# Altium footprint library SYNCBOX_V3I1.PcbLib: 251 footprints (part 9 of 16)
Each footprint in its own frame and in the unit in brackets; x right, y up, seen from the top. Pads: shape width x height; smd on the part's side, far side on the other; paste and mask are expansions set on the pad; w line width, h text height; cw(c..) or ccw(c..) is an arc to the next point about the centre after c.
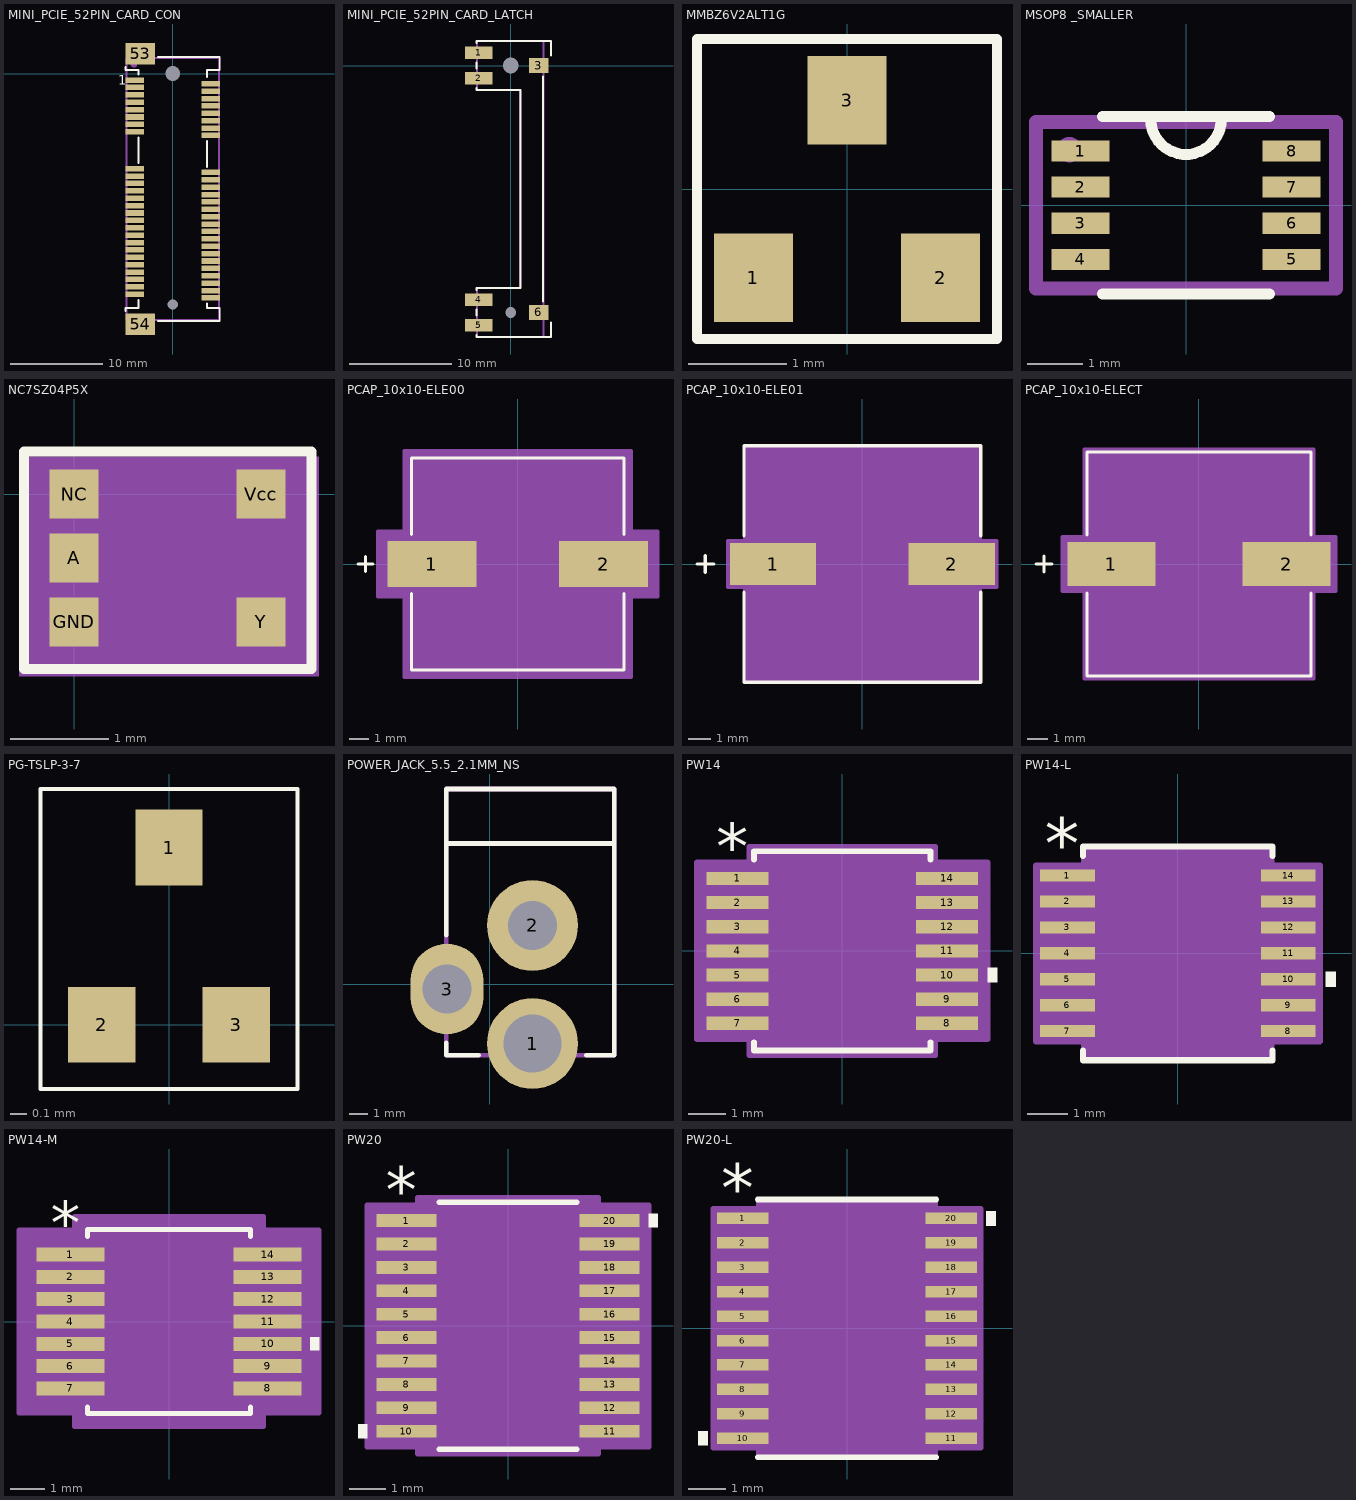
[diagram p8: the footprints below, top view; thin cyan lines are the x and y axes]

## MINI_PCIE_52PIN_CARD_CON [mm]
pads (56):
  rect 2x0.6 smd mask+0.05: 1(-4.1,-0.7) 2(4.1,-1.1) 3(-4.1,-1.5) 4(4.1,-1.9) 5(-4.1,-2.3) 6(4.1,-2.7) 7(-4.1,-3.1) 8(4.1,-3.5) 9(-4.1,-3.9) 10(4.1,-4.3) 11(-4.1,-4.7) 12(4.1,-5.1) 13(-4.1,-5.5) 14(4.1,-5.9) 15(-4.1,-6.3) 16(4.1,-6.7) 17(-4.1,-10.3) 18(4.1,-10.7) 19(-4.1,-11.1) 20(4.1,-11.5) 21(-4.1,-11.9) 22(4.1,-12.3) 23(-4.1,-12.7) 24(4.1,-13.1) 25(-4.1,-13.5) 26(4.1,-13.9) 27(-4.1,-14.3) 28(4.1,-14.7) 29(-4.1,-15.1) 30(4.1,-15.5) 31(-4.1,-15.9) 32(4.1,-16.3) 33(-4.1,-16.7) 34(4.1,-17.1) 35(-4.1,-17.5) 36(4.1,-17.9) 37(-4.1,-18.3) 38(4.1,-18.7) 39(-4.1,-19.1) 40(4.1,-19.5) 41(-4.1,-19.9) 42(4.1,-20.3) 43(-4.1,-20.7) 44(4.1,-21.1) 45(-4.1,-21.5) 46(4.1,-21.9) 47(-4.1,-22.3) 48(4.1,-22.7) 49(-4.1,-23.1) 50(4.1,-23.5) 51(-4.1,-23.9) 52(4.1,-24.3)
  rect 3.2x2.3 smd: 53(-3.5,2.15) 54(-3.5,-27.15)
  rrect70% 0x0 hole 1.6: 55(0,0)
  rrect70% 0x0 hole 1.1: 56(0,-25)
Top Overlay:
  lines w0.2: -5.1,-25.7 -5.1,-25.4 -3.7,-25.4 -3.7,-24.5 ; -5.1,0.7 -5.1,0.4 -3.7,0.4 -3.7,-0.1 ; -3.7,-9.7 -3.7,-6.9 ; -1.6,-26.8 5.1,-26.8 5.1,-25.4 3.7,-25.4 3.7,-24.9 ; -1.6,1.8 5.1,1.8 5.1,0.4 3.7,0.4 3.7,-0.4 ; 3.7,-10.1 3.7,-7.3
  text "1" at -5.9,-1.2 h1.02
Mechanical 16:
  circle w0.5: c-4.2,1 r0.1
  lines w0.2: -5,-26.7 5,-26.7 5,1.7 -5,1.7 -5,-26.7
Mechanical 29:
  text ".Designator" at -0.6,-10.9 h1.52
3D body "K3D-MM60-52B1-E1-R2 JAE Connector Division Proprietary.STEP": height 5.95, standoff -0.75, extent -5,-27.35 5,2.35

## MINI_PCIE_52PIN_CARD_LATCH [mm]
pads (8):
  rect 2.7x1.2 smd: 1(-3.15,1.25) 2(-3.15,-1.25) 4(-3.15,-22.95) 5(-3.15,-25.45)
  rect 1.9x1.5 smd: 3(2.75,0) 6(2.75,-24.2)
  rrect70% 0x0 hole 1.55: 7(0,0)
  rrect70% 0x0 hole 1.05: 8(0,-24.2)
Top Overlay:
  lines w0.2: -3.35,-26.4 -3.35,-26.6 3.95,-26.6 3.95,-25.2 ; -3.35,-24.5 -3.35,-23.9 ; -3.35,-22 -3.35,-21.8 0.95,-21.8 0.95,-2.4 -3.35,-2.4 -3.35,-2.2 ; -3.35,-0.3 -3.35,0.3 ; -3.35,2.2 -3.35,2.4 3.95,2.4 3.95,1 ; 3.15,-23.1 3.15,-1.1
Mechanical 16:
  lines w0.2: -3.3,-26.6 3.2,-26.6 3.2,2.4 -3.3,2.4 -3.3,-2.4 0.9,-2.4 0.9,-21.8 -3.3,-21.8 -3.3,-26.6
Mechanical 29:
  text ".Designator" at 1.5,-11.1 h1
3D body "K3D-MM60-EZH059-B5-R2 JAE Connector Division Proprietary.STEP": height 6.7, standoff -0.9, extent -3.95,-26.6 3.95,2.4

## MINI_PCIE_FULL CARD [mm]
3D body "PCI Express Mini Card (Full-Mini Card).step": height 6.9, standoff 2.15, extent 0,0 50.95,30

## MMBZ6V2ALT1G [mm]
pads (3):
  rect 0.8x0.9 smd: 1(-0.95,-0.9) 2(0.95,-0.9) 3(0,0.9)
Top Overlay:
  lines w0.1: -1.524,-1.524 1.524,-1.524 1.524,1.524 -1.524,1.524 -1.524,-1.524
3D body: height 0.89, standoff 0.01, extent -1.524,-0.889 1.524,0.889
3D body: height 0.3, standoff 0.01, extent -0.381,0.889 0.381,1.27
3D body: height 0.3, standoff 0.01, extent -1.27,-1.27 -0.635,-0.889
3D body: height 0.3, standoff 0.01, extent 0.635,-1.27 1.27,-0.889

## MSOP8 _SMALLER [mm]
pads (8):
  rect 1.04x0.38 smd mask+0.076: 1(-1.9,0.975) 2(-1.9,0.325) 3(-1.9,-0.325) 4(-1.9,-0.975) 5(1.9,-0.975) 6(1.9,-0.325) 7(1.9,0.325) 8(1.9,0.975)
Top Overlay:
  lines w0.2: -1.5,-1.6 1.5,-1.6 ; -1.5,1.6 1.5,1.6 ; -0.635,1.549 ccw(c0,1.549) 0.635,1.549
Mechanical 16:
  circle w0.254: c-2.1,1 r0.1
  lines w0.254: -2.7,-1.5 2.7,-1.5 2.7,1.5 -2.7,1.5 -2.7,-1.5
Mechanical 29:
  text ".Designator" at 1,0.4 h1
3D body: height 0.9, standoff 0, extent -1.5,-1.6 1.5,1.6

## NC7SZ04P5X [mm]
pads (5):
  rect 0.5x0.5 smd: A(0,-0.65) GND(0,-1.3) NC(0,0) Vcc(1.9,0) Y(1.9,-1.3)
Top Overlay:
  lines w0.1: -0.508,-1.778 2.413,-1.778 2.413,0.432 -0.508,0.432 -0.508,-1.778
Mechanical 15:
  rectangle: -0.559,-1.854 2.489,0.381
3D body: height 1.9, standoff 0.1, extent 0,-1.549 1.93,0.254
3D body: height 0.25, standoff 0, extent -0.127,-0.178 0,0.152
3D body: height 0.25, standoff 0, extent -0.127,-0.813 0,-0.457
3D body: height 0.25, standoff 0, extent -0.127,-1.448 0,-1.092
3D body: height 0.25, standoff 0, extent 1.93,-1.448 2.057,-1.118
3D body: height 0.25, standoff 0, extent 1.93,-0.178 2.083,0.127

## PCAP_10x10-ELE00 [mil]
pads (2):
  rect 177x91 smd paste+0 mask+0: 1(-171,0) 2(171,0)
Top Overlay:
  lines w6: -318.5,0 -288.5,0 ; -303.5,-15 -303.5,15 ; -211.5,-58.6 -211.5,-211.5 211.5,-211.5 211.5,-58.6 ; -211.5,58.6 -211.5,211.5 211.5,211.5 211.5,58.6
Mechanical 13:
  lines w1: -318.5,0 -288.5,0 ; -303.5,-15 -303.5,15 ; -206.5,-103.25 -103.25,-206.5 ; -206.5,103.25 -103.25,206.5 ; -206.5,-206.5 206.5,-206.5 206.5,206.5 -206.5,206.5 -206.5,-206.5
Mechanical 15:
  region: -226.5,-65.5 -279.5,-65.5 -279.5,65.5 -226.5,65.5 -226.5,226.5 226.5,226.5 226.5,65.5 279.5,65.5 279.5,-65.5 226.5,-65.5 226.5,-226.5 -226.5,-226.5
  lines w6: -279.5,-65.5 -279.5,65.5 -226.5,65.5 -226.5,226.5 226.5,226.5 226.5,65.5 279.5,65.5 279.5,-65.5 226.5,-65.5 226.5,-226.5 -226.5,-226.5 -226.5,-65.5 -279.5,-65.5
3D body "PCAP_10x10-ELECT.step": height 415.12, standoff 0, extent -220.51,-206.5 220.51,206.5
3D body: height 10, standoff 0, extent 0,0 10,10

## PCAP_10x10-ELE01 [mil]
pads (2):
  rect 154x75 smd paste+0 mask+0: 1(-159.5,0) 2(159.5,0)
Top Overlay:
  lines w6: -295.5,0 -265.5,0 ; -280.5,-15 -280.5,15 ; -211.5,-50.6 -211.5,-211.5 211.5,-211.5 211.5,-50.6 ; -211.5,50.6 -211.5,211.5 211.5,211.5 211.5,50.6
Mechanical 13:
  lines w1: -295.5,0 -265.5,0 ; -280.5,-15 -280.5,15 ; -206.5,-103.25 -103.25,-206.5 ; -206.5,103.25 -103.25,206.5 ; -206.5,-206.5 206.5,-206.5 206.5,206.5 -206.5,206.5 -206.5,-206.5
Mechanical 15:
  region: -210.5,-41.5 -240.5,-41.5 -240.5,41.5 -210.5,41.5 -210.5,210.5 210.5,210.5 210.5,41.5 240.5,41.5 240.5,-41.5 210.5,-41.5 210.5,-210.5 -210.5,-210.5
  lines w6: -240.5,-41.5 -240.5,41.5 -210.5,41.5 -210.5,210.5 210.5,210.5 210.5,41.5 240.5,41.5 240.5,-41.5 210.5,-41.5 210.5,-210.5 -210.5,-210.5 -210.5,-41.5 -240.5,-41.5
3D body "PCAP_10x10-ELECT-L.step": height 415.12, standoff 0, extent -220.51,-206.49 220.52,206.5
3D body: height 10, standoff 0, extent 0,0 10,10

## PCAP_10x10-ELECT [mil]
pads (2):
  rect 166x83 smd paste+0 mask+0: 1(-165.5,0) 2(165.5,0)
Top Overlay:
  lines w6: -307.5,0 -277.5,0 ; -292.5,-15 -292.5,15 ; -211.5,-54.6 -211.5,-211.5 211.5,-211.5 211.5,-54.6 ; -211.5,54.6 -211.5,211.5 211.5,211.5 211.5,54.6
Mechanical 13:
  lines w1: -307.5,0 -277.5,0 ; -292.5,-15 -292.5,15 ; -206.5,-103.25 -103.25,-206.5 ; -206.5,103.25 -103.25,206.5 ; -206.5,-206.5 206.5,-206.5 206.5,206.5 -206.5,206.5 -206.5,-206.5
Mechanical 15:
  region: -216.5,-51.5 -258.5,-51.5 -258.5,51.5 -216.5,51.5 -216.5,216.5 216.5,216.5 216.5,51.5 258.5,51.5 258.5,-51.5 216.5,-51.5 216.5,-216.5 -216.5,-216.5
  lines w6: -258.5,-51.5 -258.5,51.5 -216.5,51.5 -216.5,216.5 216.5,216.5 216.5,51.5 258.5,51.5 258.5,-51.5 216.5,-51.5 216.5,-216.5 -216.5,-216.5 -216.5,-51.5 -258.5,-51.5
3D body: height 10, standoff 0, extent 0,0 10,10
3D body "PCAP_10x10-ELECT-M.step": height 415.12, standoff 0, extent -220.51,-206.49 220.52,206.5

## PG-TSLP-3-7 [mm]
pads (3):
  rect 0.4x0.45 smd: 1(0,1.05) 2(-0.4,0) 3(0.4,0)
Top Overlay:
  lines w0.025: -0.762,0.508 -0.762,0.381 ; -0.762,0.381 -0.762,1.397 0.762,1.397 0.762,-0.381 -0.762,-0.381 -0.762,0.381
3D body "User Library-SOT-723.STEP": height 0.45, standoff -0.01, extent -0.615,0.034 0.635,1.084

## POWER_JACK_5.5_2.1MM_NS [mm]
pads (3):
  round 5 hole 3.2: 1(2.35,-3.25)
  round 5 hole 2.7: 2(2.35,3.25)
  oval 4x5 hole 2.7: 3(-2.35,-0.25)
Top Overlay:
  lines w0.254: -2.4,-3.2 -2.4,-3.9 -0.6,-3.9 ; -2.4,2.7 -2.4,10.75 6.85,10.75 6.85,-3.9 5.3,-3.9 ; -2.4,7.75 6.85,7.75
Mechanical 16:
  lines w0.254: -2.4,-3.9 -2.4,10.75 6.85,10.75 6.85,-3.9 -2.4,-3.9
Mechanical 29:
  text ".Designator" at -0.27,1.34 h1.52
3D body "CUI-PJ-002AH.step": height 11, standoff -3.5, extent -2.55,-3.9 6.85,10.5

## PW14 [mil]
pads (14):
  rect 66x14 smd paste+0 mask+0: 1(-111,76.77) 2(-111,51.18) 3(-111,25.59) 4(-111,0) 5(-111,-25.59) 6(-111,-51.18) 7(-111,-76.77) 8(111,-76.77) 9(111,-51.18) 10(111,-25.59) 11(111,0) 12(111,25.59) 13(111,51.18) 14(111,76.77)
Top Overlay:
  region: 154,-18.09 164,-18.09 164,-33.09 154,-33.09
  lines w6: -93.5,-96.87 -93.5,-105.5 93.5,-105.5 93.5,-96.87 ; -93.5,96.87 -93.5,105.5 93.5,105.5 93.5,96.87
  text "*" at -133.5,85.77 h50
Mechanical 13:
  lines w0: -12,100.5 ccw(c0,100.5) 12,100.5
  lines w1: -130,-82.77 -130,-70.77 -88.5,-70.77 -88.5,-82.77 -130,-82.77 ; -130,-57.18 -130,-45.18 -88.5,-45.18 -88.5,-57.18 -130,-57.18 ; -130,-31.59 -130,-19.59 -88.5,-19.59 -88.5,-31.59 -130,-31.59 ; -130,-6 -130,6 -88.5,6 -88.5,-6 -130,-6 ; -130,19.59 -130,31.59 -88.5,31.59 -88.5,19.59 -130,19.59 ; -130,45.18 -130,57.18 -88.5,57.18 -88.5,45.18 -130,45.18 ; -130,70.77 -130,82.77 -88.5,82.77 -88.5,70.77 -130,70.77 ; -88.5,-100.5 88.5,-100.5 88.5,100.5 -88.5,100.5 -88.5,-100.5 ; 88.5,-82.77 88.5,-70.77 130,-70.77 130,-82.77 88.5,-82.77 ; 88.5,-57.18 88.5,-45.18 130,-45.18 130,-57.18 88.5,-57.18 ; 88.5,-31.59 88.5,-19.59 130,-19.59 130,-31.59 88.5,-31.59 ; 88.5,-6 88.5,6 130,6 130,-6 88.5,-6 ; 88.5,19.59 88.5,31.59 130,31.59 130,19.59 88.5,19.59 ; 88.5,45.18 88.5,57.18 130,57.18 130,45.18 88.5,45.18 ; 88.5,70.77 88.5,82.77 130,82.77 130,70.77 88.5,70.77
  text "*" at -86,47.5 h50
Mechanical 15:
  region: -98.5,-93.77 -154,-93.77 -154,93.77 -98.5,93.77 -98.5,110.5 98.5,110.5 98.5,93.77 154,93.77 154,-93.77 98.5,-93.77 98.5,-110.5 -98.5,-110.5
  lines w6: -154,-93.77 -154,93.77 -98.5,93.77 -98.5,110.5 98.5,110.5 98.5,93.77 154,93.77 154,-93.77 98.5,-93.77 98.5,-110.5 -98.5,-110.5 -98.5,-93.77 -154,-93.77
3D body: height 10, standoff 0, extent 0,0 10,10
3D body "PW14.step": height 47.09, standoff 0, extent -130,-100.51 130,100.51

## PW14-L [mil]
pads (14):
  rect 54x12 smd paste+0 mask+0: 1(-109,76.77) 2(-109,51.18) 3(-109,25.59) 4(-109,0) 5(-109,-25.59) 6(-109,-51.18) 7(-109,-76.77) 8(109,-76.77) 9(109,-51.18) 10(109,-25.59) 11(109,0) 12(109,25.59) 13(109,51.18) 14(109,76.77)
Top Overlay:
  region: 146,-18.09 156,-18.09 156,-33.09 146,-33.09
  lines w6: -93.5,-95.87 -93.5,-105.5 93.5,-105.5 93.5,-95.87 ; -93.5,95.87 -93.5,105.5 93.5,105.5 93.5,95.87
  text "*" at -131.5,83.77 h50
Mechanical 13:
  lines w0: -12,100.5 ccw(c0,100.5) 12,100.5
  lines w1: -130,-82.77 -88.5,-82.77 -88.5,-70.77 -130,-70.77 -130,-82.77 ; -130,-57.18 -88.5,-57.18 -88.5,-45.18 -130,-45.18 -130,-57.18 ; -130,-31.59 -88.5,-31.59 -88.5,-19.59 -130,-19.59 -130,-31.59 ; -130,-6 -88.5,-6 -88.5,6 -130,6 -130,-6 ; -130,19.59 -88.5,19.59 -88.5,31.59 -130,31.59 -130,19.59 ; -130,45.18 -88.5,45.18 -88.5,57.18 -130,57.18 -130,45.18 ; -130,70.77 -88.5,70.77 -88.5,82.77 -130,82.77 -130,70.77 ; -88.5,-100.5 -88.5,100.5 88.5,100.5 88.5,-100.5 -88.5,-100.5 ; 88.5,-82.77 130,-82.77 130,-70.77 88.5,-70.77 88.5,-82.77 ; 88.5,-57.18 130,-57.18 130,-45.18 88.5,-45.18 88.5,-57.18 ; 88.5,-31.59 130,-31.59 130,-19.59 88.5,-19.59 88.5,-31.59 ; 88.5,-6 130,-6 130,6 88.5,6 88.5,-6 ; 88.5,19.59 130,19.59 130,31.59 88.5,31.59 88.5,19.59 ; 88.5,45.18 130,45.18 130,57.18 88.5,57.18 88.5,45.18 ; 88.5,70.77 130,70.77 130,82.77 88.5,82.77 88.5,70.77
  text "*" at -86,47.5 h50
Mechanical 15:
  region: -92.5,-86.77 -140,-86.77 -140,86.77 -92.5,86.77 -92.5,104.5 92.5,104.5 92.5,86.77 140,86.77 140,-86.77 92.5,-86.77 92.5,-104.5 -92.5,-104.5
  lines w6: -140,-86.77 -92.5,-86.77 -92.5,-104.5 92.5,-104.5 92.5,-86.77 140,-86.77 140,86.77 92.5,86.77 92.5,104.5 -92.5,104.5 -92.5,86.77 -140,86.77 -140,-86.77
3D body "PW14-L.step": height 47.09, standoff 0, extent -130,-101.02 130,100
3D body: height 10, standoff 0, extent 0,0 10,10

## PW14-M [mil]
pads (14):
  rect 78x16 smd paste+0 mask+0: 1(-113,76.77) 2(-113,51.18) 3(-113,25.59) 4(-113,0) 5(-113,-25.59) 6(-113,-51.18) 7(-113,-76.77) 8(113,-76.77) 9(113,-51.18) 10(113,-25.59) 11(113,0) 12(113,25.59) 13(113,51.18) 14(113,76.77)
Top Overlay:
  region: 162,-18.09 172,-18.09 172,-33.09 162,-33.09
  lines w6: -93.5,-97.87 -93.5,-105.5 93.5,-105.5 93.5,-97.87 ; -93.5,97.87 -93.5,105.5 93.5,105.5 93.5,97.87
  text "*" at -135.5,87.77 h50
Mechanical 13:
  lines w0: -12,100.5 ccw(c0,100.5) 12,100.5
  lines w1: -130,-82.77 -130,-70.77 -88.5,-70.77 -88.5,-82.77 -130,-82.77 ; -130,-57.18 -130,-45.18 -88.5,-45.18 -88.5,-57.18 -130,-57.18 ; -130,-31.59 -130,-19.59 -88.5,-19.59 -88.5,-31.59 -130,-31.59 ; -130,-6 -130,6 -88.5,6 -88.5,-6 -130,-6 ; -130,19.59 -130,31.59 -88.5,31.59 -88.5,19.59 -130,19.59 ; -130,45.18 -130,57.18 -88.5,57.18 -88.5,45.18 -130,45.18 ; -130,70.77 -130,82.77 -88.5,82.77 -88.5,70.77 -130,70.77 ; -88.5,-100.5 88.5,-100.5 88.5,100.5 -88.5,100.5 -88.5,-100.5 ; 88.5,-82.77 88.5,-70.77 130,-70.77 130,-82.77 88.5,-82.77 ; 88.5,-57.18 88.5,-45.18 130,-45.18 130,-57.18 88.5,-57.18 ; 88.5,-31.59 88.5,-19.59 130,-19.59 130,-31.59 88.5,-31.59 ; 88.5,-6 88.5,6 130,6 130,-6 88.5,-6 ; 88.5,19.59 88.5,31.59 130,31.59 130,19.59 88.5,19.59 ; 88.5,45.18 88.5,57.18 130,57.18 130,45.18 88.5,45.18 ; 88.5,70.77 88.5,82.77 130,82.77 130,70.77 88.5,70.77
  text "*" at -86,47.5 h50
Mechanical 15:
  region: -108.5,-104.77 -172,-104.77 -172,104.77 -108.5,104.77 -108.5,120.5 108.5,120.5 108.5,104.77 172,104.77 172,-104.77 108.5,-104.77 108.5,-120.5 -108.5,-120.5
  lines w6: -172,-104.77 -172,104.77 -108.5,104.77 -108.5,120.5 108.5,120.5 108.5,104.77 172,104.77 172,-104.77 108.5,-104.77 108.5,-120.5 -108.5,-120.5 -108.5,-104.77 -172,-104.77
3D body: height 10, standoff 0, extent 0,0 10,10
3D body "PW14-M.step": height 47.09, standoff 0, extent -130,-100.51 130,100.51

## PW20 [mil]
pads (20):
  rect 66x14 smd paste+0 mask+0: 1(-111,115.16) 2(-111,89.57) 3(-111,63.98) 4(-111,38.39) 5(-111,12.8) 6(-111,-12.8) 7(-111,-38.39) 8(-111,-63.98) 9(-111,-89.57) 10(-111,-115.16) 11(111,-115.16) 12(111,-89.57) 13(111,-63.98) 14(111,-38.39) 15(111,-12.8) 16(111,12.8) 17(111,38.39) 18(111,63.98) 19(111,89.57) 20(111,115.16)
Top Overlay:
  region: -154,-107.66 -164,-107.66 -164,-122.66 -154,-122.66
  region: 154,122.66 164,122.66 164,107.66 154,107.66
  lines w6: -75.42,-135 75.42,-135 ; -75.42,135 75.42,135
  text "*" at -133.5,124.16 h50
Mechanical 13:
  lines w0: -12,130 ccw(c0,130) 12,130
  lines w1: -130,-121.16 -130,-109.16 -88.5,-109.16 -88.5,-121.16 -130,-121.16 ; -130,-95.57 -130,-83.57 -88.5,-83.57 -88.5,-95.57 -130,-95.57 ; -130,-69.98 -130,-57.98 -88.5,-57.98 -88.5,-69.98 -130,-69.98 ; -130,-44.39 -130,-32.39 -88.5,-32.39 -88.5,-44.39 -130,-44.39 ; -130,-18.8 -130,-6.8 -88.5,-6.8 -88.5,-18.8 -130,-18.8 ; -130,6.8 -130,18.8 -88.5,18.8 -88.5,6.8 -130,6.8 ; -130,32.39 -130,44.39 -88.5,44.39 -88.5,32.39 -130,32.39 ; -130,57.98 -130,69.98 -88.5,69.98 -88.5,57.98 -130,57.98 ; -130,83.57 -130,95.57 -88.5,95.57 -88.5,83.57 -130,83.57 ; -130,109.16 -130,121.16 -88.5,121.16 -88.5,109.16 -130,109.16 ; -88.5,-130 88.5,-130 88.5,130 -88.5,130 -88.5,-130 ; 88.5,-121.16 88.5,-109.16 130,-109.16 130,-121.16 88.5,-121.16 ; 88.5,-95.57 88.5,-83.57 130,-83.57 130,-95.57 88.5,-95.57 ; 88.5,-69.98 88.5,-57.98 130,-57.98 130,-69.98 88.5,-69.98 ; 88.5,-44.39 88.5,-32.39 130,-32.39 130,-44.39 88.5,-44.39 ; 88.5,-18.8 88.5,-6.8 130,-6.8 130,-18.8 88.5,-18.8 ; 88.5,6.8 88.5,18.8 130,18.8 130,6.8 88.5,6.8 ; 88.5,32.39 88.5,44.39 130,44.39 130,32.39 88.5,32.39 ; 88.5,57.98 88.5,69.98 130,69.98 130,57.98 88.5,57.98 ; 88.5,83.57 88.5,95.57 130,95.57 130,83.57 88.5,83.57 ; 88.5,109.16 88.5,121.16 130,121.16 130,109.16 88.5,109.16
  text "*" at -86,77 h50
Mechanical 15:
  region: -98.5,-132.16 -154,-132.16 -154,132.16 -98.5,132.16 -98.5,140 98.5,140 98.5,132.16 154,132.16 154,-132.16 98.5,-132.16 98.5,-140 -98.5,-140
  lines w6: -154,-132.16 -154,132.16 -98.5,132.16 -98.5,140 98.5,140 98.5,132.16 154,132.16 154,-132.16 98.5,-132.16 98.5,-140 -98.5,-140 -98.5,-132.16 -154,-132.16
3D body "PW20.step": height 47.09, standoff 0, extent -130,-130 130,130
3D body: height 10, standoff 0, extent 0,0 10,10

## PW20-L [mil]
pads (20):
  rect 54x12 smd paste+0 mask+0: 1(-109,115.16) 2(-109,89.57) 3(-109,63.98) 4(-109,38.39) 5(-109,12.8) 6(-109,-12.8) 7(-109,-38.39) 8(-109,-63.98) 9(-109,-89.57) 10(-109,-115.16) 11(109,-115.16) 12(109,-89.57) 13(109,-63.98) 14(109,-38.39) 15(109,-12.8) 16(109,12.8) 17(109,38.39) 18(109,63.98) 19(109,89.57) 20(109,115.16)
Top Overlay:
  region: -146,-107.66 -156,-107.66 -156,-122.66 -146,-122.66
  region: 146,122.66 156,122.66 156,107.66 146,107.66
  lines w6: -93.5,-135 93.5,-135 ; -93.5,135 93.5,135
  text "*" at -131.5,122.16 h50
Mechanical 13:
  lines w0: -12,130 ccw(c0,130) 12,130
  lines w1: -130,-121.16 -130,-109.16 -88.5,-109.16 -88.5,-121.16 -130,-121.16 ; -130,-95.57 -130,-83.57 -88.5,-83.57 -88.5,-95.57 -130,-95.57 ; -130,-69.98 -130,-57.98 -88.5,-57.98 -88.5,-69.98 -130,-69.98 ; -130,-44.39 -130,-32.39 -88.5,-32.39 -88.5,-44.39 -130,-44.39 ; -130,-18.8 -130,-6.8 -88.5,-6.8 -88.5,-18.8 -130,-18.8 ; -130,6.8 -130,18.8 -88.5,18.8 -88.5,6.8 -130,6.8 ; -130,32.39 -130,44.39 -88.5,44.39 -88.5,32.39 -130,32.39 ; -130,57.98 -130,69.98 -88.5,69.98 -88.5,57.98 -130,57.98 ; -130,83.57 -130,95.57 -88.5,95.57 -88.5,83.57 -130,83.57 ; -130,109.16 -130,121.16 -88.5,121.16 -88.5,109.16 -130,109.16 ; -88.5,-130 88.5,-130 88.5,130 -88.5,130 -88.5,-130 ; 88.5,-121.16 88.5,-109.16 130,-109.16 130,-121.16 88.5,-121.16 ; 88.5,-95.57 88.5,-83.57 130,-83.57 130,-95.57 88.5,-95.57 ; 88.5,-69.98 88.5,-57.98 130,-57.98 130,-69.98 88.5,-69.98 ; 88.5,-44.39 88.5,-32.39 130,-32.39 130,-44.39 88.5,-44.39 ; 88.5,-18.8 88.5,-6.8 130,-6.8 130,-18.8 88.5,-18.8 ; 88.5,6.8 88.5,18.8 130,18.8 130,6.8 88.5,6.8 ; 88.5,32.39 88.5,44.39 130,44.39 130,32.39 88.5,32.39 ; 88.5,57.98 88.5,69.98 130,69.98 130,57.98 88.5,57.98 ; 88.5,83.57 88.5,95.57 130,95.57 130,83.57 88.5,83.57 ; 88.5,109.16 88.5,121.16 130,121.16 130,109.16 88.5,109.16
  text "*" at -86,77 h50
Mechanical 15:
  region: -92.5,-125.16 -140,-125.16 -140,125.16 -92.5,125.16 -92.5,134 92.5,134 92.5,125.16 140,125.16 140,-125.16 92.5,-125.16 92.5,-134 -92.5,-134
  lines w6: -140,-125.16 -140,125.16 -92.5,125.16 -92.5,134 92.5,134 92.5,125.16 140,125.16 140,-125.16 92.5,-125.16 92.5,-134 -92.5,-134 -92.5,-125.16 -140,-125.16
3D body "PW20-L.step": height 47.09, standoff 0, extent -130,-130 130,130
3D body: height 10, standoff 0, extent 0,0 10,10